# Altium schematic symbol library StanzaBoard.SchLib: 23 symbols
Pins are listed as number, name and electrical type; pins without a type are passive.

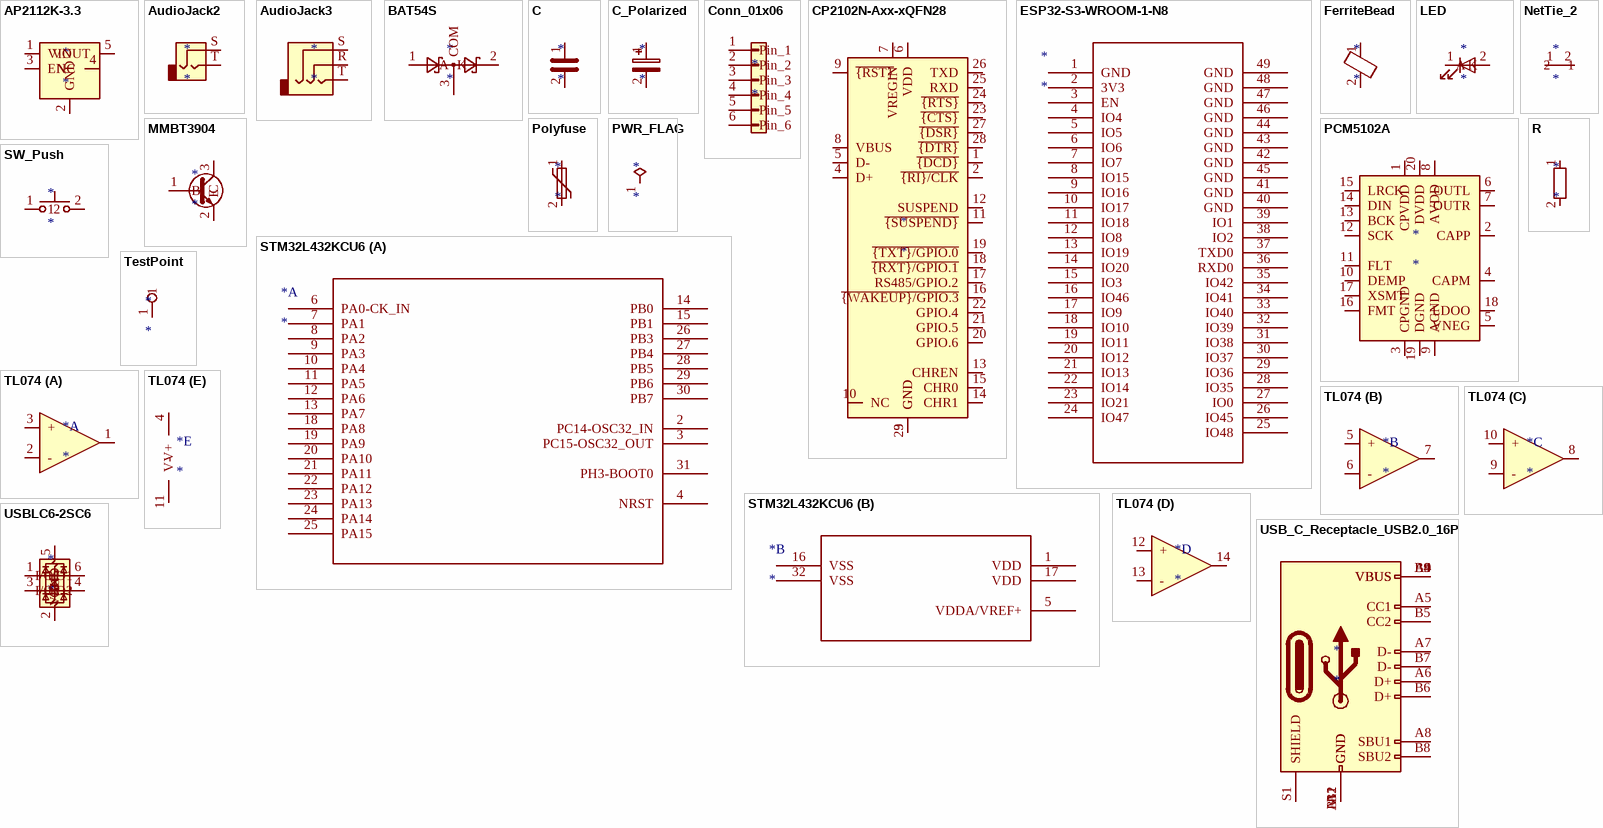
[diagram p0: symbols AP2112K-3.3 to USBLC6-2SC6]

## AP2112K-3.3
designator *
pins: 1 VIN, 2 GND, 3 EN, 4 NC, 5 VOUT

## AudioJack2
designator *
pins: S, T

## AudioJack3
designator *
pins: R, S, T

## BAT54S
designator *
pins: 1 A, 2 K, 3 COM

## C
designator *
pins: 1, 2

## C_Polarized
designator *
pins: 1, 2

## Conn_01x06
designator *
pins: 1 Pin_1, 2 Pin_2, 3 Pin_3, 4 Pin_4, 5 Pin_5, 6 Pin_6

## CP2102N-Axx-xQFN28
designator *
pins: 1 ~{{DCD}}, 2 ~{{RI}/CLK}, 3 GND, 4 D+, 5 D-, 6 VDD, 7 VREGIN, 8 VBUS, 9 ~{{RST}}, 10 NC, 11 ~{{SUSPEND}}, 12 SUSPEND, 13 CHREN, 14 CHR1, 15 CHR0, 16 ~{{WAKEUP}/GPIO.3}, 17 RS485/GPIO.2, 18 ~{{RXT}/GPIO.1}, 19 ~{{TXT}/GPIO.0}, 20 GPIO.6, 21 GPIO.5, 22 GPIO.4, 23 ~{{CTS}}, 24 ~{{RTS}}, 25 RXD, 26 TXD, 27 ~{{DSR}}, 28 ~{{DTR}}, 29 GND

## ESP32-S3-WROOM-1-N8
designator *
pins: 1 GND, 2 3V3, 3 EN, 4 IO4, 5 IO5, 6 IO6, 7 IO7, 8 IO15, 9 IO16, 10 IO17, 11 IO18, 12 IO8, 13 IO19, 14 IO20, 15 IO3, 16 IO46, 17 IO9, 18 IO10, 19 IO11, 20 IO12, 21 IO13, 22 IO14, 23 IO21, 24 IO47, 25 IO48, 26 IO45, 27 IO0, 28 IO35, 29 IO36, 30 IO37, 31 IO38, 32 IO39, 33 IO40, 34 IO41, 35 IO42, 36 RXD0, 37 TXD0, 38 IO2, 39 IO1, 40 GND, 41 GND, 42 GND, 43 GND, 44 GND, 45 GND, 46 GND, 47 GND, 48 GND, 49 GND

## FerriteBead
designator *
pins: 1, 2

## LED
designator *
pins: 1 K, 2 A

## MMBT3904
designator *
pins: 1 B, 2 E, 3 C

## NetTie_2
designator *
pins: 1, 2

## PCM5102A
designator *
pins: 1 CPVDD, 2 CAPP, 3 CPGND, 4 CAPM, 5 VNEG, 6 OUTL, 7 OUTR, 8 AVDD, 9 AGND, 10 DEMP, 11 FLT, 12 SCK, 13 BCK, 14 DIN, 15 LRCK, 16 FMT, 17 XSMT, 18 LDOO, 19 DGND, 20 DVDD

## Polyfuse
designator *
pins: 1, 2

## PWR_FLAG
designator *  (graphical)
pins: 1

## R
designator *
pins: 1, 2

## STM32L432KCU6
designator *
part A pins: 2 PC14-OSC32_IN, 3 PC15-OSC32_OUT, 4 NRST, 6 PA0-CK_IN, 7 PA1, 8 PA2, 9 PA3, 10 PA4, 11 PA5, 12 PA6, 13 PA7, 14 PB0, 15 PB1, 18 PA8, 19 PA9, 20 PA10, 21 PA11, 22 PA12, 23 PA13, 24 PA14, 25 PA15, 26 PB3, 27 PB4, 28 PB5, 29 PB6, 30 PB7, 31 PH3-BOOT0
part B pins: 1 VDD, 5 VDDA/VREF+, 16 VSS, 17 VDD, 32 VSS

## SW_Push
designator *
pins: 1, 2

## TestPoint
designator *
pins: 1

## TL074
designator *
part A pins: 1, 2 -, 3 +
part B pins: 5 +, 6 -, 7
part C pins: 8, 9 -, 10 +
part D pins: 12 +, 13 -, 14
part E pins: 4 V+, 11 V-

## USB_C_Receptacle_USB2.0_16P
designator *
pins: A1 GND, A4 VBUS, A5 CC1, A6 D+, A7 D-, A8 SBU1, A9 VBUS, A12 GND, B1 GND, B4 VBUS, B5 CC2, B6 D+, B7 D-, B8 SBU2, B9 VBUS, B12 GND, S1 SHIELD

## USBLC6-2SC6
designator *
pins: 1 I/O1, 2 GND, 3 I/O2, 4 I/O2, 5 VBUS, 6 I/O1